# Altium schematic symbol library 24位AD小板子.SCHLIB: 29 symbols
Pins are listed as number, name and electrical type; pins without a type are passive.

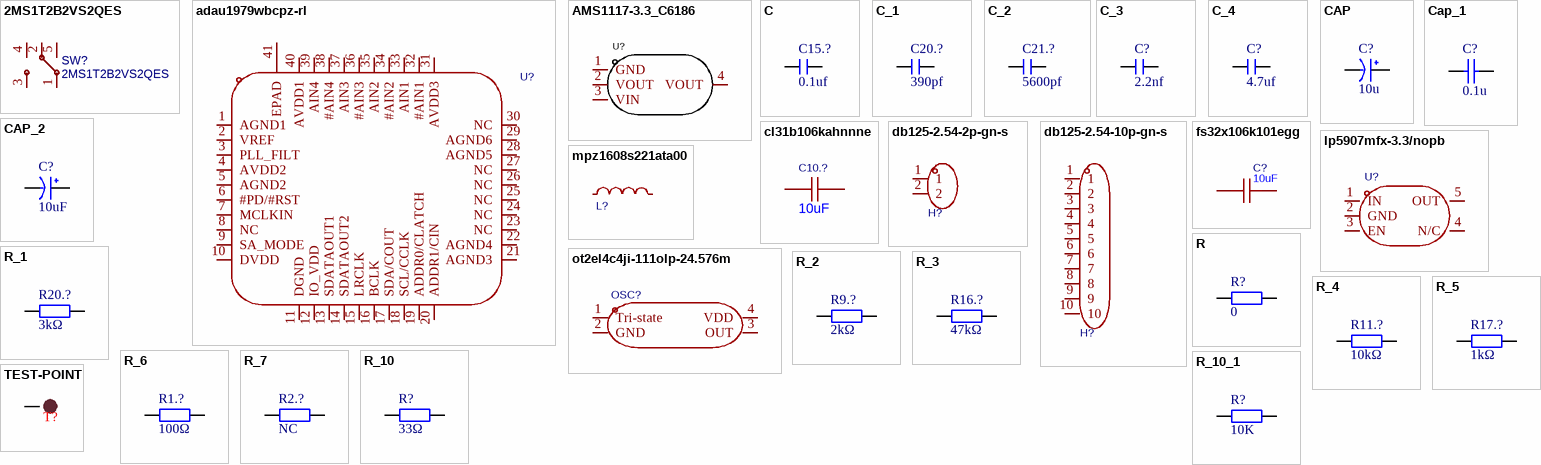
[diagram p0: symbols 2MS1T2B2VS2QES to TEST-POINT]

## 2MS1T2B2VS2QES
designator SW?
BOM_Manufacturer: Dailywell; Contributor: LCSC; BOM_Supplier: LCSC; BOM_Supplier Part: C545202; BOM_Manufacturer Part: 2MS1T2B2VS2QES; BOM_JLCPCB Part Class: Extended Part; spicePre: S; spiceSymbolName: 2MS1T2B2VS2QES
footprint SW-TH_2MS1T2B2VS2QES
pins: 1, 2, 3, 4, 5

## adau1979wbcpz-rl
designator U?  (value not drawn)
分辨率:24;工作电压:3.3V~3.6V;接口类型:I2C；SPI;; Manufacturer: ADI(亚德诺); AddInBom: yes; ModelId: 7c9bc19ca4c64354924a13059f0c15c7; ModelName: QFN-40_L6.0-W6.0-P0.50-TL-EP4.1; ModelTransform: 237.007,237.007,0,0,0,0,0,0,0; Resolution: 24; Number of Channels: 4; Symbol: ADAU1979WBCPZ-RL; LCSC Part Name: 四通道模数转换器(ADC); SupplierPart: C207957; ManufacturerPart: ADAU1979WBCPZ-RL; Supplier Footprint: LFCSP-40(6x6); JLCPCB Part Class: Extended Part; Datasheet: https://item.szlcsc.com/datasheet/ADAU1979WBCPZ-RL/209011.html; Supplier: LCSC; ConvertToPcb: yes; FootprintName: QFN-40_L6.0-W6.0-P0.50-TL-EP4.1; Voltage - Supply: 3.3V~3.6V; Interface Type: I2C；SPI; Operating Temperature: -40℃~+105℃
footprint QFN-40_L6.0-W6.0-P0.50-TL-EP4.1
pins: 1 AGND1, 2 VREF, 3 PLL_FILT, 4 AVDD2, 5 AGND2, 6 #PD/#RST, 7 MCLKIN, 8 NC, 9 SA_MODE, 10 DVDD, 11 DGND, 12 IO_VDD, 13 SDATAOUT1, 14 SDATAOUT2, 15 LRCLK, 16 BCLK, 17 SDA/COUT, 18 SCL/CCLK, 19 ADDR0/CLATCH, 20 ADDR1/CIN, 21 AGND3, 22 AGND4, 23 NC, 24 NC, 25 NC, 26 NC, 27 NC, 28 AGND5, 29 AGND6, 30 NC, 31 AVDD3, 32 #AIN1, 33 AIN1, 34 #AIN2, 35 AIN2, 36 #AIN3, 37 AIN3, 38 #AIN4, 39 AIN4, 40 AVDD1, 41 EPAD

## AMS1117-3.3_C6186
designator U?  (value not drawn)
Manufacturer: AMS; Add into BOM: yes; Output Type: 固定; Output Voltage: 3.3V; MAX Output Current: 1A; Power Supply Rejection Ratio (PSRR): 72dB@(120Hz); Dropout Voltage: 1.3V@(800mA); Output Polarity: 正极; Number of Outputs: 1; Symbol: AMS1117-3.3; Device: AMS1117-3.3_C6186; LCSC Part Name: 输出3.3V 1A; Supplier Part: C6186; Manufacturer Part: AMS1117-3.3; Supplier Footprint: SOT-223-3; JLCPCB Part Class: Basic Part; Datasheet: https://atta.szlcsc.com/upload/public/pdf/source/20180727/C6186_7A095716F0823C02F1997A905E26C086.pdf; Supplier: LCSC; Convert to PCB: yes; Maximum Input Voltage: -; standby current: -; Noise: -; Feature: -; Operating Temperature: -
footprint SOT-223-3_L6.5-W3.4-P2.30-LS7.0-BR
pins: 1 GND, 2 VOUT, 3 VIN, 4 VOUT

## C
designator C15.?, comment 0.1uf
无极性贴片电容; 版权归属: 源创客; BOM名称: 无极性贴片电容; 学习资源: www.ooocke.com
footprint 0603C
pins: 1, 2

## C_1
designator C20.?, comment 390pf
无极性贴片电容; 版权归属: 源创客; BOM名称: 无极性贴片电容; 学习资源: www.ooocke.com
footprint 0603C
pins: 1, 2

## C_2
designator C21.?, comment 5600pf
无极性贴片电容; 版权归属: 源创客; BOM名称: 无极性贴片电容; 学习资源: www.ooocke.com
footprint 0603C
pins: 1, 2

## C_3
designator C?, comment 2.2nf
无极性贴片电容; 版权归属: 源创客; BOM名称: 无极性贴片电容; 学习资源: www.ooocke.com
footprint 0603C
pins: 1, 2

## C_4
designator C?, comment 4.7uf
无极性贴片电容; 版权归属: 源创客; BOM名称: 无极性贴片电容; 学习资源: www.ooocke.com
footprint 0603C
pins: 1, 2

## CAP
designator C?, comment 10u
footprint 5x11mm
pins: 1 VCC, 2 GND

## Cap_1
designator C?, comment 0.1u
Capacitor; Value: 104; Published: 8-Jun-2000; LatestRevisionDate: 17-Jul-2002; LatestRevisionNote: Re-released for DXP Platform.; Publisher: Altium Limited
simulation model CAP (Capacitor)
signal-integrity model Cap
footprint 0603C
pins: 1, 2

## CAP_2
designator C?, comment 10uF
footprint 5x11mm
pins: 1 VCC, 2 GND

## cl31b106kahnnne
designator C10.?, comment 10uF
容值:10uF;精度:±10%;额定电压:25V;温度系数:X7R;; Manufacturer: SAMSUNG(三星); Symbol: CL31B106KAHNNNE; AddInBom: yes; ModelId: e4be705b945545a48e666415e3682bd8; ModelName: C1206_L3.2-W1.6-H1.3; ModelTransform: 125.984,62.992,0,0,0,0,0,0,0; Tolerance: ±10%; Voltage Rating: 25V; Temperature Coefficient: X7R; LCSC Part Name: 10uF ±10% 25V; SupplierPart: C14860; ManufacturerPart: CL31B106KAHNNNE; Supplier Footprint: 1206; JLCPCB Part Class: Extended Part; Datasheet: https://item.szlcsc.com/datasheet/CL31B106KAHNNNE/15532.html; Supplier: LCSC; ConvertToPcb: yes; FootprintName: C1206; Value: 10uF
footprint C1206
pins: 1, 2

## db125-2.54-2p-gn-s
designator H?  (value not drawn)
结构:1x2P;间距:2.54mm;颜色:绿色;安装方式:直插;排数:1;每排PIN数:2;额定电流:7A;额定电压:150V;线规 - AWG:18~26;线规 - 平方毫米:1;工作温度:-40℃~+105℃;; Manufacturer: DORABO(地博电气); AddInBom: yes; ModelId: e364713d301b433da8ecef6fca46e972; ModelName: CONN-TH_DB125-2.54-2P-GN; ModelTransform: 218.90114,248.031,0,0,0,0,0,-0.591,-137.795; Number of Positions or Pins: 1x2P; Pitch: 2.54mm; Number of PINs Per Row: 2; Current Rating: 7A; Voltage Rating (Max): 150V; Wire Gauge - AWG: 18~26; Wire Gauge - mm2: 1; Symbol: DB125-2.54-2P-GN; LCSC Part Name: 1x2P 2.54mm 直插 排数:1 每排P数:2; SupplierPart: C918120; ManufacturerPart: DB125-2.54-2P-GN-S; Supplier Footprint: 插件,P=2.54mm; JLCPCB Part Class: Extended Part; Datasheet: https://item.szlcsc.com/datasheet/DB125-2.54-2P-GN-S/993699.html; Supplier: LCSC; ConvertToPcb: yes; FootprintName: CONN-TH_DB125-2.54-2P-GN; Color: 绿色; Mounting Type: 直插; Number of Pins: 2P; Number of Rows: 1; Operating Temperature: -40℃~+105℃
footprint CONN-TH_DB125-2.54-2P-GN
pins: 1, 2

## db125-2.54-10p-gn-s
designator H?  (value not drawn)
结构:1x10P;间距:2.54mm;颜色:绿色;安装方式:直插;排数:1;每排PIN数:10;额定电流:7A;额定电压:150V;线规 - AWG:18~26;线规 - 平方毫米:1;工作温度:-40℃~+105℃;; Manufacturer: DORABO(地博电气); AddInBom: yes; ModelId: 934ae3ef449145f3aa19ce6d989e0b59; ModelName: CONN-TH_DB125-2.54-10P-GN; ModelTransform: 999.99796,246.8499,0,180,0,0,0,0,-137.795; Number of Positions or Pins: 1x10P; Pitch: 2.54mm; Number of PINs Per Row: 10; Current Rating: 7A; Voltage Rating (Max): 150V; Wire Gauge - AWG: 18~26; Wire Gauge - mm2: 1; Symbol: DB125-2.54-10P-GN; LCSC Part Name: 1x10P 2.54mm 直插 排数:1 每排P数:10; SupplierPart: C918128; ManufacturerPart: DB125-2.54-10P-GN-S; Supplier Footprint: 插件,P=2.54mm; JLCPCB Part Class: Extended Part; Datasheet: https://item.szlcsc.com/datasheet/DB125-2.54-10P-GN-S/993707.html; Supplier: LCSC; ConvertToPcb: yes; FootprintName: CONN-TH_DB125-2.54-10P-GN; Color: 绿色; Mounting Type: 直插; Number of Pins: 10P; Number of Rows: 1; Operating Temperature: -40℃~+105℃
footprint CONN-TH_DB125-2.54-10P-GN
pins: 1, 2, 3, 4, 5, 6, 7, 8, 9, 10

## fs32x106k101egg
designator C?, comment 10uF
容值:10uF;精度:±10%;额定电压:100V;温度系数:X7R;; Manufacturer: PSA(信昌电陶); Symbol: FS32X106K101EGG; AddInBom: yes; ModelId: 833068e7fe044595a6eec77c56179455; ModelName: C1210_L3.2-W2.5-H2.5; ModelTransform: 125.984,98.425,0,0,0,0,0,0,0; Tolerance: ±10%; Voltage Rating: 100V; Temperature Coefficient: X7R; LCSC Part Name: 10uF ±10% 100V; SupplierPart: C5156756; ManufacturerPart: FS32X106K101EGG; Supplier Footprint: 1210; JLCPCB Part Class: Extended Part; Datasheet: https://item.szlcsc.com/datasheet/FS32X106K101EGG/5791227.html; Supplier: LCSC; ConvertToPcb: yes; FootprintName: C1210; Value: 10uF
footprint C1210
pins: 1, 2

## lp5907mfx-3.3/nopb
designator U?  (value not drawn)
输出极性:正极;工作电压:5.5V;输出电压:3.3V;输出电流:250mA;电源纹波抑制比(PSRR):82dB@(1kHz);输出类型:固定;; Manufacturer: TI(德州仪器); AddInBom: yes; ModelId: 0a2a1b8f50944f73965918ad6e5fe167; ModelName: SOT-23-5_L2.9-W1.6-H1.1-LS2.8-P0.95; ModelTransform: 114.173,109.636,0,180,0,0,0,0,0; Output Configuration: 正极; Voltage - Supply: 5.5V; Output Voltage: 3.3V; Output Current: 250mA; Voltage Dropout: 250mV@(250mA); standby current: 12uA; Noise: 10uVrms; Output Type: 固定; Number of Outputs: 1; Symbol: LP5907MFX-3.3/NOPB; LCSC Part Name: 3.3V 250mA 5.5V; SupplierPart: C80670; ManufacturerPart: LP5907MFX-3.3/NOPB; Supplier Footprint: SOT-23-5; JLCPCB Part Class: Extended Part; Datasheet: https://www.ti.com/cn/lit/ds/symlink/lp5907.pdf; Supplier: LCSC; ConvertToPcb: yes; FootprintName: SOT-23-5_L3.0-W1.7-P0.95-LS2.8-BR; Power Supply Rejection Ratio (PSRR): 82dB@(1kHz); Features: 热关断；使能控制；输出放电；短路保护；输入欠压保护; Operating Temperature: -40℃~+125℃@(Tj)
footprint SOT-23-5_L3.0-W1.7-P0.95-LS2.8-BR
pins: 1 IN, 2 GND, 3 EN, 4 N/C, 5 OUT

## mpz1608s221ata00
designator L?  (value not drawn)
标称阻抗@测试频率:220Ω@100MHz;误差:±25%;直流电阻(RDC):50mΩ;; Manufacturer: TDK; AddInBom: yes; ModelId: 2bc5ec593d464d6ba9807aec0b5673c2; ModelName: L0603_L1.6-W0.8-H0.5_BEAD; ModelTransform: 62.992,31.496,0,180,0,0,0.094,0.629,0; Tolerance: ±25%; DC Resistance: 50mΩ; Current Rating: 2.2A; Circuits: 1; Symbol: MPZ1608S221ATA00; LCSC Part Name: 单路 0603磁珠 阻抗220Ω@100MHz; SupplierPart: C76815; ManufacturerPart: MPZ1608S221ATA00; Supplier Footprint: 0603; JLCPCB Part Class: Extended Part; Datasheet: https://atta.szlcsc.com/upload/public/pdf/source/20160918/1474166931723.pdf; Supplier: LCSC; ConvertToPcb: yes; FootprintName: L0603; Impedance @ Frequency: 220Ω@100MHz
footprint L0603
pins: 1, 2

## ot2el4c4ji-111olp-24.576m
designator OSC?  (value not drawn)
频率:24.576MHz;常温频差:±10ppm;输出模式:CMOS;工作电压:1.8V~3.3V;频率稳定度:±20ppm;; Manufacturer: YXC(扬兴晶振); AddInBom: yes; ModelId: ae22b8d143894765bc8100c37cb6356f; ModelName: OSC-SMD_4P-L3.2-W2.5-H1.0; ModelTransform: 125.984,98.425,0,0,0,0,0,0,0; Normal temperature Frequency Tolerance: ±10ppm; Output Type: CMOS; Frequency Stability: ±20ppm; Symbol: OT2EL4C4JI-111OLP-24.576M; LCSC Part Name: YSO110TR 24.576MHZ 1.8V-3.3V ±10PPM -40~85℃（±20PPM) CMOS; SupplierPart: C5203547; ManufacturerPart: OT2EL4C4JI-111OLP-24.576M; Supplier Footprint: SMD3225-4P; JLCPCB Part Class: Extended Part; Datasheet: https://item.szlcsc.com/datasheet/OT2EL4C4JI-111OLP-24.576M/5892909.html; Supplier: LCSC; ConvertToPcb: yes; FootprintName: OSC-SMD_4P-L3.2-W2.5-BL; Value: 24.576MHz; Voltage - Supply: 1.8V~3.3V; Operating Temperature: -40℃~+85℃
footprint OSC-SMD_4P-L3.2-W2.5-BL
pins: 1 Tri-state, 2 GND, 3 OUT, 4 VDD

## R
designator R?, comment 0
贴片电阻; 版权归属: 源创客; BOM名称: 贴片电阻; 学习资源: www.ooocke.com
footprint 0603R
pins: 1, 2

## R_1
designator R20.?, comment 3kΩ
贴片电阻; 版权归属: 源创客; BOM名称: 贴片电阻; 学习资源: www.ooocke.com
footprint 0603R
pins: 1, 2

## R_2
designator R9.?, comment 2kΩ
贴片电阻; 版权归属: 源创客; BOM名称: 贴片电阻; 学习资源: www.ooocke.com
footprint 0603R
pins: 1, 2

## R_3
designator R16.?, comment 47kΩ
贴片电阻; 版权归属: 源创客; BOM名称: 贴片电阻; 学习资源: www.ooocke.com
footprint 0603R
pins: 1, 2

## R_4
designator R11.?, comment 10kΩ
贴片电阻; 版权归属: 源创客; BOM名称: 贴片电阻; 学习资源: www.ooocke.com
footprint 0603R
pins: 1, 2

## R_5
designator R17.?, comment 1kΩ
贴片电阻; 版权归属: 源创客; BOM名称: 贴片电阻; 学习资源: www.ooocke.com
footprint 0603R
pins: 1, 2

## R_6
designator R1.?, comment 100Ω
贴片电阻; 版权归属: 源创客; BOM名称: 贴片电阻; 学习资源: www.ooocke.com
footprint 0603R
pins: 1, 2

## R_7
designator R2.?, comment NC
贴片电阻; 版权归属: 源创客; BOM名称: 贴片电阻; 学习资源: www.ooocke.com
footprint 0603R
pins: 1, 2

## R_10
designator R?, comment 33Ω
贴片电阻; 版权归属: 源创客; BOM名称: 贴片电阻; 学习资源: www.ooocke.com
footprint 0603R
pins: 1, 2

## R_10_1
designator R?, comment 10K
贴片电阻; 版权归属: 源创客; BOM名称: 贴片电阻; 学习资源: www.ooocke.com
footprint 0603R
pins: 1, 2

## TEST-POINT
designator T?, comment TEST POINT  (value not drawn)
测试点
footprint TEST
pins: 1